# Altium schematic symbol library STM32MP157CAD3.SchLib: 2 symbols
Pins are listed as number, name and electrical type; pins without a type are passive.

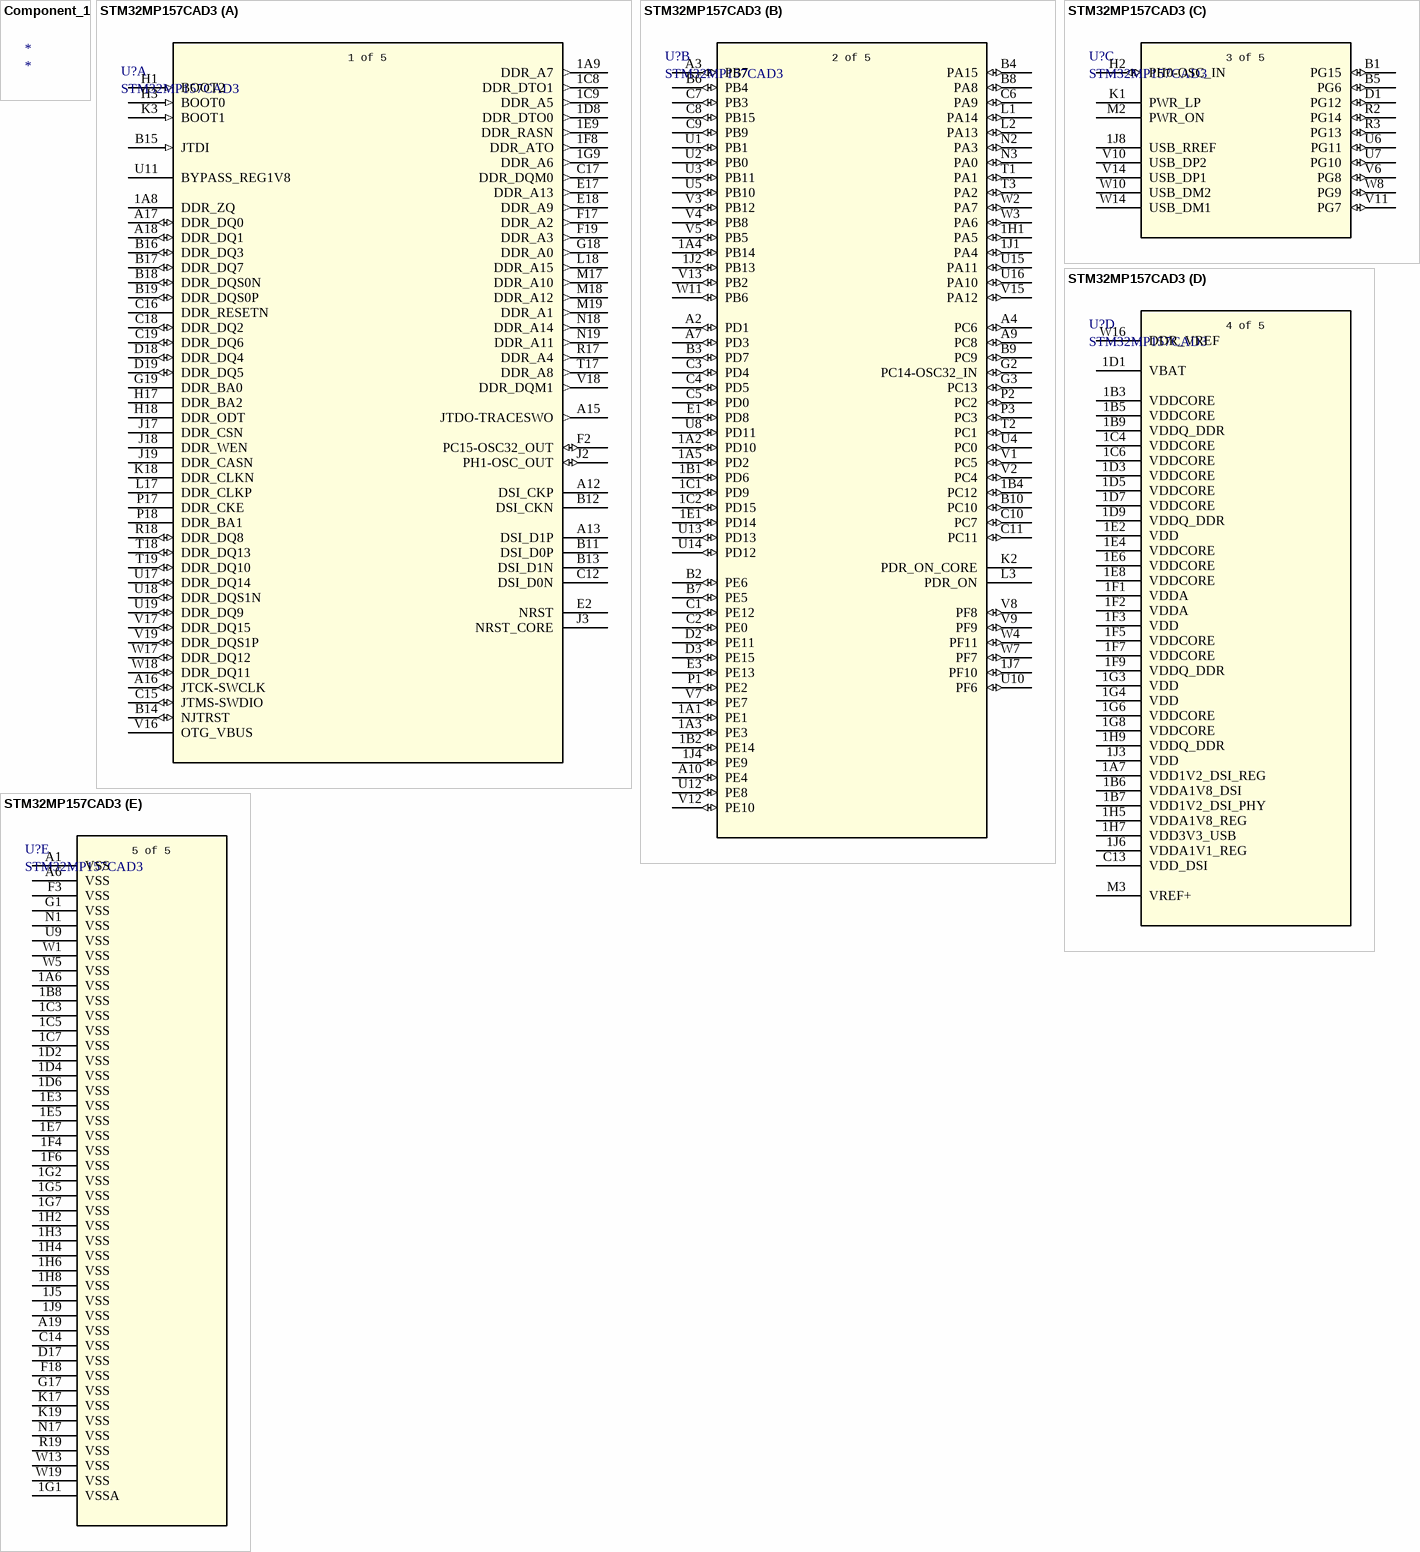
[diagram p0: symbols Component_1 to STM32MP157CAD3]

## Component_1
designator *

## STM32MP157CAD3
designator U?
No Description Available; Mfr_Name: STMicroelectronics; Copyright: Copyright (C) 2022 Ultra Librarian. All rights reserved.; Manufacturer_Part_Number: STM32MP157CAD3; RefDes: RefDes; Type: DEV
footprint TFBGA257_10X10
part A pins: 1A8 DDR_ZQ, 1A9 DDR_A7 (out), 1C8 DDR_DTO1 (out), 1C9 DDR_A5 (out), 1D8 DDR_DTO0 (out), 1E9 DDR_RASN (out), 1F8 DDR_ATO (out), 1G9 DDR_A6 (out), A12 DSI_CKP, A13 DSI_D1P, A15 JTDO-TRACESWO (out), A16 JTCK-SWCLK (io), A17 DDR_DQ0 (io), A18 DDR_DQ1 (io), B11 DSI_D0P, B12 DSI_CKN, B13 DSI_D1N, B14 NJTRST (io), B15 JTDI (in), B16 DDR_DQ3 (io), B17 DDR_DQ7 (io), B18 DDR_DQS0N (io), B19 DDR_DQS0P (io), C12 DSI_D0N, C15 JTMS-SWDIO (io), C16 DDR_RESETN, C17 DDR_DQM0 (out), C18 DDR_DQ2 (io), C19 DDR_DQ6 (io), D18 DDR_DQ4 (io), D19 DDR_DQ5 (io), E2 NRST, E17 DDR_A13 (out), E18 DDR_A9 (out), F2 PC15-OSC32_OUT (io), F17 DDR_A2 (out), F19 DDR_A3 (out), G18 DDR_A0 (out), G19 DDR_BA0, H1 BOOT2 (in), H3 BOOT0 (in), H17 DDR_BA2, H18 DDR_ODT, J2 PH1-OSC_OUT (io), J3 NRST_CORE, J17 DDR_CSN, J18 DDR_WEN, J19 DDR_CASN, K3 BOOT1 (in), K18 DDR_CLKN, L17 DDR_CLKP, L18 DDR_A15 (out), M17 DDR_A10 (out), M18 DDR_A12 (out), M19 DDR_A1 (out), N18 DDR_A14 (out), N19 DDR_A11 (out), P17 DDR_CKE, P18 DDR_BA1, R17 DDR_A4 (out), R18 DDR_DQ8 (io), T17 DDR_A8 (out), T18 DDR_DQ13 (io), T19 DDR_DQ10 (io), U11 BYPASS_REG1V8, U17 DDR_DQ14 (io), U18 DDR_DQS1N (io), U19 DDR_DQ9 (io), V16 OTG_VBUS, V17 DDR_DQ15 (io), V18 DDR_DQM1 (out), V19 DDR_DQS1P (io), W17 DDR_DQ12 (io), W18 DDR_DQ11 (io)
part B pins: 1A1 PE1 (io), 1A2 PD10 (io), 1A3 PE3 (io), 1A4 PB14 (io), 1A5 PD2 (io), 1B1 PD6 (io), 1B2 PE14 (io), 1B4 PC12 (io), 1C1 PD9 (io), 1C2 PD15 (io), 1E1 PD14 (io), 1H1 PA5 (io), 1J1 PA4 (io), 1J2 PB13 (io), 1J4 PE9 (io), 1J7 PF10 (io), A2 PD1 (io), A3 PB7 (io), A4 PC6 (io), A7 PD3 (io), A9 PC8 (io), A10 PE4 (io), B2 PE6 (io), B3 PD7 (io), B4 PA15 (io), B6 PB4 (io), B7 PE5 (io), B8 PA8 (io), B9 PC9 (io), B10 PC10 (io), C1 PE12 (io), C2 PE0 (io), C3 PD4 (io), C4 PD5 (io), C5 PD0 (io), C6 PA9 (io), C7 PB3 (io), C8 PB15 (io), C9 PB9 (io), C10 PC7 (io), C11 PC11 (io), D2 PE11 (io), D3 PE15 (io), E1 PD8 (io), E3 PE13 (io), G2 PC14-OSC32_IN (io), G3 PC13 (io), K2 PDR_ON_CORE, L1 PA14 (io), L2 PA13 (io), L3 PDR_ON, N2 PA3 (io), N3 PA0 (io), P1 PE2 (io), P2 PC2 (io), P3 PC3 (io), T1 PA1 (io), T2 PC1 (io), T3 PA2 (io), U1 PB1 (io), U2 PB0 (io), U3 PB11 (io), U4 PC0 (io), U5 PB10 (io), U8 PD11 (io), U10 PF6 (io), U12 PE8 (io), U13 PD13 (io), U14 PD12 (io), U15 PA11 (io), U16 PA10 (io), V1 PC5 (io), V2 PC4 (io), V3 PB12 (io), V4 PB8 (io), V5 PB5 (io), V7 PE7 (io), V8 PF8 (io), V9 PF9 (io), V12 PE10 (io), V13 PB2 (io), V15 PA12 (io), W2 PA7 (io), W3 PA6 (io), W4 PF11 (io), W7 PF7 (io), W11 PB6 (io)
part C pins: 1J8 USB_RREF, B1 PG15 (io), B5 PG6 (io), D1 PG12 (io), H2 PH0-OSC_IN (io), K1 PWR_LP, M2 PWR_ON, R2 PG14 (io), R3 PG13 (io), U6 PG11 (io), U7 PG10 (io), V6 PG8 (io), V10 USB_DP2, V11 PG7 (io), V14 USB_DP1, W8 PG9 (io), W10 USB_DM2, W14 USB_DM1
part D pins: 1A7 VDD1V2_DSI_REG (power), 1B3 VDDCORE (power), 1B5 VDDCORE (power), 1B6 VDDA1V8_DSI (power), 1B7 VDD1V2_DSI_PHY (power), 1B9 VDDQ_DDR (power), 1C4 VDDCORE (power), 1C6 VDDCORE (power), 1D1 VBAT (power), 1D3 VDDCORE (power), 1D5 VDDCORE (power), 1D7 VDDCORE (power), 1D9 VDDQ_DDR (power), 1E2 VDD (power), 1E4 VDDCORE (power), 1E6 VDDCORE (power), 1E8 VDDCORE (power), 1F1 VDDA (power), 1F2 VDDA (power), 1F3 VDD (power), 1F5 VDDCORE (power), 1F7 VDDCORE (power), 1F9 VDDQ_DDR (power), 1G3 VDD (power), 1G4 VDD (power), 1G6 VDDCORE (power), 1G8 VDDCORE (power), 1H5 VDDA1V8_REG (power), 1H7 VDD3V3_USB (power), 1H9 VDDQ_DDR (power), 1J3 VDD (power), 1J6 VDDA1V1_REG (power), C13 VDD_DSI (power), M3 VREF+ (power), W16 DDR_VREF
part E pins: 1A6 VSS (power), 1B8 VSS (power), 1C3 VSS (power), 1C5 VSS (power), 1C7 VSS (power), 1D2 VSS (power), 1D4 VSS (power), 1D6 VSS (power), 1E3 VSS (power), 1E5 VSS (power), 1E7 VSS (power), 1F4 VSS (power), 1F6 VSS (power), 1G1 VSSA (power), 1G2 VSS (power), 1G5 VSS (power), 1G7 VSS (power), 1H2 VSS (power), 1H3 VSS (power), 1H4 VSS (power), 1H6 VSS (power), 1H8 VSS (power), 1J5 VSS (power), 1J9 VSS (power), A1 VSS (power), A6 VSS (power), A19 VSS (power), C14 VSS (power), D17 VSS (power), F3 VSS (power), F18 VSS (power), G1 VSS (power), G17 VSS (power), K17 VSS (power), K19 VSS (power), N1 VSS (power), N17 VSS (power), R19 VSS (power), U9 VSS (power), W1 VSS (power), W5 VSS (power), W13 VSS (power), W19 VSS (power)
part A text: 1 of 5
part B text: 2 of 5
part C text: 3 of 5
part D text: 4 of 5
part E text: 5 of 5